# Altium footprint library UJ20-C-V-SMT-TR-68.PcbLib: 1 footprints
Each footprint in its own frame and in the unit in brackets; x right, y up, seen from the top. Pads: shape width x height; smd on the part's side, far side on the other; paste and mask are expansions set on the pad; w line width, h text height; cw(c..) or ccw(c..) is an arc to the next point about the centre after c.
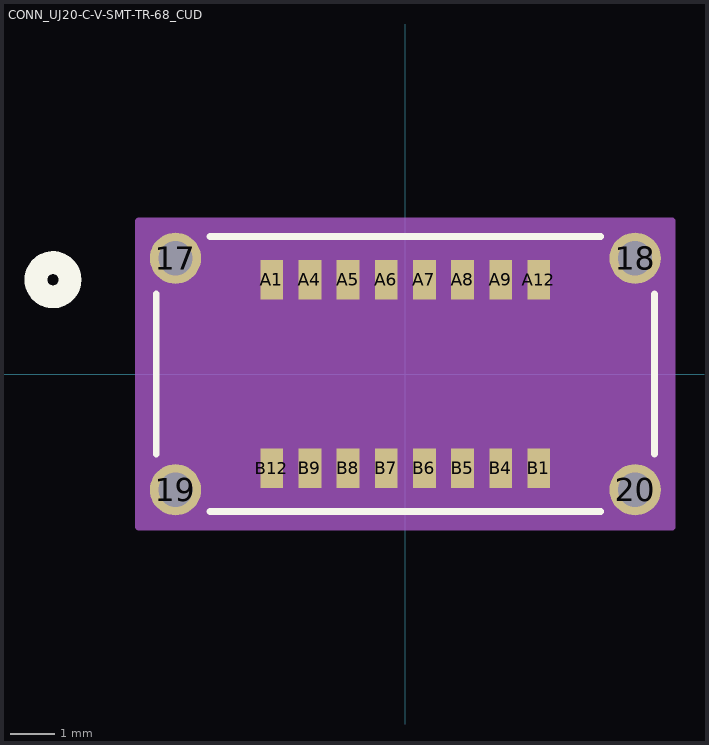
[diagram p0: the footprint, top view; thin cyan lines are the x and y axes]

## CONN_UJ20-C-V-SMT-TR-68_CUD [mil]
pads (20):
  round 45 hole 30 paste-22.5 mask+0: 17(-201.57,101.57) 18(201.57,101.57) 19(-201.57,-101.57) 20(201.57,-101.57)
  rect 20x35 smd paste+0 mask+0: A1(-117.13,82.68) A4(-83.66,82.68) A5(-50.2,82.68) A6(-16.73,82.68) A7(16.73,82.68) A8(50.2,82.68) A9(83.66,82.68) A12(117.13,82.68) B1(117.13,-82.68) B4(83.66,-82.68) B5(50.2,-82.68) B6(16.73,-82.68) B7(-16.73,-82.68) B8(-50.2,-82.68) B9(-83.66,-82.68) B12(-117.13,-82.68)
Top Overlay:
  circle w20: c-309.07,82.68 r15
  lines w6: -218.5,-70.26 -218.5,70.26 ; -171.42,-120.5 171.42,-120.5 ; -171.42,120.5 171.42,120.5 ; 218.5,-70.26 218.5,70.26
  text ".Designator" at -137.5,-25 h50
Bottom Overlay:
  circle w20: c-309.07,82.68 r15
Mechanical 13:
  circle w20: c-117.13,82.68 r15
  lines w1: -213.5,-115.5 213.5,-115.5 213.5,115.5 -213.5,115.5 -213.5,-115.5
  text ".Designator" at -137.5,-25 h50
Mechanical 15:
  region: 234.07,134.07 -234.07,134.07 -234.07,-134.07 234.07,-134.07
  lines w6: -234.07,-134.07 -234.07,134.07 234.07,134.07 234.07,-134.07 -234.07,-134.07